# Altium schematic symbol library Opam-Comp...SchLib: 36 symbols
Pins are listed as number, name and electrical type; pins without a type are passive.

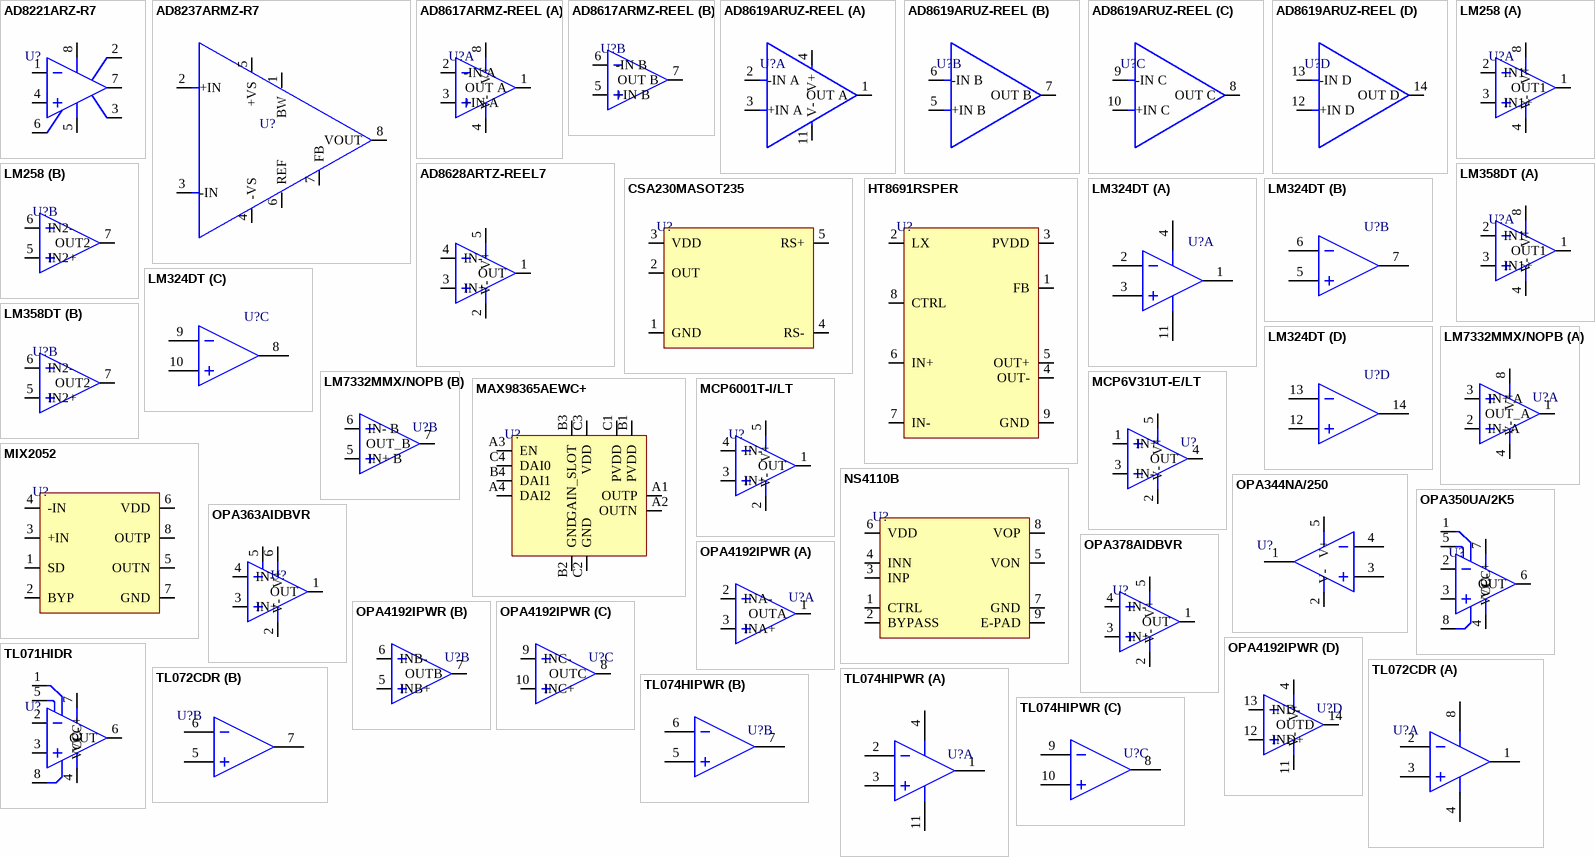
[diagram p0: symbols AD8221ARZ-R7 to TL074HIPWR]

## AD8221ARZ-R7
designator U?
IC OPAMP INSTR 825KHZ 8SOIC; Manufacturer: Analog Devices; Manufacturer Part Number: AD8221ARZ-R7; Number of Channels: 1; Common Mode Rejection Ratio: 80dB; Min Dual Supply Voltage: 2.3V; Max Dual Supply Voltage: 18V; Slew Rate: 2.5V/µs; Nominal Supply Current: 1mA; Max Power Dissipation: 200mW; Bandwidth: 562kHz; Input Bias Current: 1.5nA; Input Offset Voltage (Vos): 60uV; Output Current per Channel: 18mA; Power Supply Rejection Ratio (PSRR): 130dB; Voltage Gain: 60dB; Input Resistance: 100GR; Quiescent Current: 900uA; Operating Supply Voltage: 36V; Supplier 1: Mouser; RoHS: Yes; Category: Amplifiers - Op Amps, Buffer, Instrumentation; Pricing 1: 1=7.37000, 10=6.66000, 25=6.35000, 50=6.35000, 100=5.51000, 250=5.27000, 500=4.80000, 1000=4.37000, 10000=4.37000 (USD); Case/Package: SOIC; Number of Pins: 8; Contact Plating: Tin,Matte; Min Operating Temperature: -40°C; Max Operating Temperature: 85°C; -3db Bandwidth: 825kHz; Package Quantity: 1000; Packaging: Tape and Reel; Number of Circuits: 1; Operating Supply Current: 1mA; Number of Elements: 1; Power Dissipation: 200mW; Series: -; Supply Current: 1mA; Radiation Hardening: No; Lead Free: Contains Lead; RoHS Compliant: Yes; ComponentLink1URL: https://datasheet.ciiva.com/15128/getdatasheetpartid-313520-15128733.pdf?src-supplier=Verical; ComponentLink1Description: https://datasheet.ciiva.com/15128/getdatasheetpartid-313520-15128733.pdf?src-supplier=Verical; ComponentLink2URL: https://datasheet.ciiva.com/2975/ad8221-2975658.pdf?src-supplier=Avnet; ComponentLink2Description: https://datasheet.ciiva.com/2975/ad8221-2975658.pdf?src-supplier=Avnet; ComponentLink3URL: https://datasheet.ciiva.com/2975/ad8221-2975980.pdf?src-supplier=Avnet; ComponentLink3Description: https://datasheet.ciiva.com/2975/ad8221-2975980.pdf?src-supplier=Avnet; ComponentLink4URL: https://datasheet.ciiva.com/6628/ad8221-6628618.pdf?src-supplier=Digi-Key; ComponentLink4Description: https://datasheet.ciiva.com/6628/ad8221-6628618.pdf?src-supplier=Digi-Key; ComponentLink5URL: https://datasheet.ciiva.com/6628/ad8221-6628619.pdf?src-supplier=Digi-Key; ComponentLink5Description: https://datasheet.ciiva.com/6628/ad8221-6628619.pdf?src-supplier=Digi-Key; ComponentLink6URL: https://datasheet.ciiva.com/6628/ad8221-6628617.pdf?src-supplier=Digi-Key; ComponentLink6Description: https://datasheet.ciiva.com/6628/ad8221-6628617.pdf?src-supplier=Digi-Key; ComponentLink7URL: https://datasheet.ciiva.com/48709/001249009-da-01-en-ic-amp-inst-prec-ad8221arz-r7-soic-8-adi-48709526.pdf?src-supplier=Conrad; ComponentLink7Description: https://datasheet.ciiva.com/48709/001249009-da-01-en-ic-amp-inst-prec-ad8221arz-r7-soic-8-adi-48709526.pdf?src-supplier=Conrad; Supplier Part Number 1: 584-AD8221ARZ-R7; LCSC Part Number: C13342; Item Type: IC
footprint SOIC-8
pins: 1 IN-, 2 RG, 3 RG, 4 IN+, 5 V- (power), 6 REF, 7 VOUT, 8 V+ (power)

## AD8237ARMZ-R7
designator U?
IC INST AMP 1 CIRCUIT 8MSOP; Manufacturer: Analog Devices; Manufacturer Part Number: AD8237ARMZ-R7; Supplier: Mouser; LCSC Part Number: C12086; RoHS: Yes; Item Type: IC; Stock: 141226; Pricing: 1=2.88, 10=2.37, 50=2.37, 100=2.13, 1000=1.56, 10000=1.47 (USD); ComponentLink1URL: https://datasheet.ciiva.com/6626/ad8237-6626733.pdf?src-supplier=Digikey; ComponentLink1Description: https://datasheet.ciiva.com/6626/ad8237-6626733.pdf?src-supplier=Digikey; ComponentLink2URL: https://datasheet.ciiva.com/8582/ad8237-8582303.pdf?src-supplier=Avnet; ComponentLink2Description: https://datasheet.ciiva.com/8582/ad8237-8582303.pdf?src-supplier=Avnet
footprint MSOP-8
pins: 1 BW, 2 +IN, 3 -IN, 4 -VS, 5 +VS, 6 REF, 7 FB, 8 VOUT

## AD8617ARMZ-REEL
designator U?
IC CMOS 2 CIRCUIT 8MSOP; Manufacturer: Analog Devices; Manufacturer Part Number: AD8617ARMZ-REEL; Supplier: Mouser; LCSC Part Number: C578787; RoHS: Yes; Item Type: IC; Stock: 4553; Pricing: 1=2.71, 10=2.43, 50=2.43, 100=1.95, 1000=1.33, 10000=1.19 (USD); ComponentLink1URL: https://datasheet.ciiva.com/1793/ad8613-8617-8619-1793776.pdf?src-supplier=Digikey; ComponentLink1Description: https://datasheet.ciiva.com/1793/ad8613-8617-8619-1793776.pdf?src-supplier=Digikey; ComponentLink2URL: https://datasheet.ciiva.com/1793/ad8613-8617-8619-1793777.pdf?src-supplier=Digikey; ComponentLink2Description: https://datasheet.ciiva.com/1793/ad8613-8617-8619-1793777.pdf?src-supplier=Digikey; ComponentLink3URL: https://datasheet.ciiva.com/1793/ad8613-8617-8619-1793778.pdf?src-supplier=Digikey; ComponentLink3Description: https://datasheet.ciiva.com/1793/ad8613-8617-8619-1793778.pdf?src-supplier=Digikey
footprint MSOP-8
part A pins: 1 OUT A, 2 -IN A, 3 +IN A, 4 V- (power), 8 V+ (power)
part B pins: 5 +IN B, 6 -IN B, 7 OUT B

## AD8619ARUZ-REEL
designator U?
IC CMOS 4 CIRCUIT 14TSSOP; Manufacturer: Analog Devices; Manufacturer Part Number: AD8619ARUZ-REEL; Item Type: Opam; Input Capacitance: 2.5pF; Supplier: Mouser; LCSC Part Number: C653014; RoHS: Yes; Stock: 2210; Pricing: 1=3.67, 10=3.12, 50=3.12, 100=2.7, 1000=1.94, 10000=1.84 (USD); Lead Free: 5698LeadFree; ComponentLink1URL: http://components.arrow.com/part/dataview/42367262S9299045N2771?src-supplier=Arrow+Electronics; ComponentLink1Description: http://components.arrow.com/part/dataview/42367262S9299045N2771?src-supplier=Arrow+Electronics; ComponentLink2URL: http://www.mouser.com/ds/2/609/AD8613_8617_8619-877840.pdf?src-supplier=Mouser; ComponentLink2Description: http://www.mouser.com/ds/2/609/AD8613_8617_8619-877840.pdf?src-supplier=Mouser; ComponentLink3URL: https://datasheet.octopart.com/AD8619ARUZ-REEL-Analog-Devices-datasheet-62341446.pdf?src-supplier=Element14; ComponentLink3Description: https://datasheet.octopart.com/AD8619ARUZ-REEL-Analog-Devices-datasheet-62341446.pdf?src-supplier=Element14; ComponentLink4URL: http://www.analog.com/static/imported-files/data_sheets/AD8613_8617_8619.pdf?src-supplier=Avnet; ComponentLink4Description: http://www.analog.com/static/imported-files/data_sheets/AD8613_8617_8619.pdf?src-supplier=Avnet; ComponentLink5URL: http://www.analog.com/media/en/technical-documentation/data-sheets/AD8613_8617_8619.pdf?src-supplier=Digikey; ComponentLink5Description: http://www.analog.com/media/en/technical-documentation/data-sheets/AD8613_8617_8619.pdf?src-supplier=Digikey
footprint TSSOP-14
part A pins: 1 OUT A, 2 -IN A, 3 +IN A, 4 V+, 11 V-
part B pins: 5 +IN B, 6 -IN B, 7 OUT B
part C pins: 8 OUT C, 9 -IN C, 10 +IN C
part D pins: 12 +IN D, 13 -IN D, 14 OUT D

## AD8628ARTZ-REEL7
designator U?
IC OPAMP ZER-DRIFT 1CIRC SOT23-5; -3db Bandwidth: 2.5MHz; Common Mode Rejection Ratio: 140dB; Number of Channels: 1; Max Supply Voltage: 5V; Min Supply Voltage: 2.7V; Operating Supply Voltage: 3V; Min Dual Supply Voltage: 1.35V; Max Dual Supply Voltage: 2.5V; Slew Rate: 1V/µs; Input Bias Current: 30pA; Input Offset Voltage (Vos): 5uV; Operating Supply Current: 1.1mA; Output Current per Channel: 30mA; Power Supply Rejection Ratio (PSRR): 130dB; Voltage Gain: 145dB; Input Capacitance: 10pF; LCSC Part Number: C29309; Item Type: IC; ComponentLink1Description: LCSC; Supplier: Mouser; Supplier Part Number: 584-AD8628ARTZ-R7; RoHS: Yes; Category: Amplifiers - Op Amps, Buffer, Instrumentation; Stock: 158154; Pricing: 1=3.02, 10=2.6, 50=2.6, 100=2.31, 1000=1.63, 10000=1.58 (USD); Case/Package: SOT-23-5; Pins: 5; Min Operating Temperature: -40°C; Max Operating Temperature: 125°C; Package Quantity: 1; Packaging: Tape and Reel; Unity Gain Bandwidth Product: 2.5MHz; Bandwidth: 2.5MHz; Number of Circuits: 1; Gain Bandwidth Product: 2.5MHz; Number of Elements: 1; Number of Amplifiers: 1; Quiescent Current: 1.1mA; Series: -; Radiation Hardening: No; Reach SVHC Compliant: No; Lead Free: Contains Lead; RoHS Compliant: Yes; ComponentLink2URL: https://datasheet.ciiva.com/1135/ad8628-8629-8630-1135896.pdf?src-supplier=Element14; ComponentLink2Description: https://datasheet.ciiva.com/1135/ad8628-8629-8630-1135896.pdf?src-supplier=Element14; ComponentLink3URL: https://datasheet.ciiva.com/46387/1852416-46387199.pdf?src-supplier=Element14; ComponentLink3Description: https://datasheet.ciiva.com/46387/1852416-46387199.pdf?src-supplier=Element14; ComponentLink4URL: https://datasheet.ciiva.com/15374/ad8628-8629-8630-249176-15374303.pdf?src-supplier=Mouser; ComponentLink4Description: https://datasheet.ciiva.com/15374/ad8628-8629-8630-249176-15374303.pdf?src-supplier=Mouser; ComponentLink5URL: https://datasheet.ciiva.com/2976/ad8628-8629-8630-2976036.pdf?src-supplier=Avnet; ComponentLink5Description: https://datasheet.ciiva.com/2976/ad8628-8629-8630-2976036.pdf?src-supplier=Avnet
footprint SOT-23-5
pins: 1 OUT, 2 V- (power), 3 IN+, 4 IN-, 5 V+ (power)

## CSA230MASOT235
designator U?
0V~76V Single SOT23-5 Current Sense Amplifiers ROHS; Manufacturer: analogysemi; Manufacturer Part Number: CSA230MASOT235; Item Type: IC; Package: SOT23-5; LCSC Part Number: C5359404; ComponentLink1Description: LCSC; ComponentLink1URL: https://www.lcsc.com/product-detail/Current-Sense-Amplifiers_analogysemi-CSA230MASOT235_C5359404.html
footprint SOT-23-5
pins: 1 GND, 2 OUT, 3 VDD, 4 RS-, 5 RS+

## HT8691RSPER
designator U?
SOP8L-PP Audio Power OpAmps ROHS; Manufacturer: Jiaxing Heroic Elec Tech; Manufacturer Part Number: HT8691RSPER; Item Type: IC; Package: SOP8L-PP; LCSC Part Number: C6705234; ComponentLink1Description: LCSC; ComponentLink1URL: https://www.lcsc.com/product-detail/Audio-Power-OpAmps_Jiaxing-Heroic-Elec-Tech-HT8691RSPER_C6705234.html
footprint 8-SO-EP_
pins: 1 FB, 2 LX, 3 PVDD, 4 OUT-, 5 OUT+, 6 IN+, 7 IN-, 8 CTRL, 9 GND

## LM258
designator U?
Dual 250nA 5mV SOP-8 Operational Amplifier ROHS; Manufacturer: HXY MOSFET; Manufacturer Part Number: LM258; Item Type: Opam; Package: SOP-8; LCSC Part Number: C6851436; ComponentLink1Description: LCSC; ComponentLink1URL: https://www.lcsc.com/product-detail/Operational-Amplifier_HXY-MOSFET-LM258_C6851436.html
footprint SOP-8
part A pins: 1 OUT1, 2 IN1-, 3 IN1+, 4 V- (power), 8 V+ (power)
part B pins: 5 IN2+, 6 IN2-, 7 OUT2

## LM324DT
designator U?
IC OPAMP GP 1.3MHZ 14SO; Manufacturer: STMicroelectronics; Manufacturer Part Number: LM324DT; Max Supply Voltage: 30V; Min Supply Voltage: 3V; Min Dual Supply Voltage: 1.5V; Max Dual Supply Voltage: 15V; Voltage Gain: 100dB; Slew Rate: 0.4V/µs; Common Mode Rejection Ratio: 70dB; Nominal Supply Current: 1.2mA; Input Offset Voltage (Vos): 7mV; Input Bias Current: 150nA; Number of Circuits: 4; Output Current per Channel: 40mA; Dual Supply Voltage: 12V; Supply Type: Single,Dual; Input Voltage Noise Density: 40nV/sqrt Hz; Max Power Dissipation: 400mW; Supplier 1: Arrow Electronics; RoHS: Yes; LCSC Part Number: C71035; Stock 1: 287500; Pricing 1: 2500=0.18900 (USD); Mount: Surface Mount; Case/Package: SO; Number of Pins: 14; Contact Plating: Tin,Matte; Weight: 0.009143oz; Min Operating Temperature: 0°C; Max Operating Temperature: 70°C; Gain Bandwidth Product: 1.3MHz; Packaging: Cut Tape; Package Quantity: 2500; Operating Supply Current: 1.2mA; Operating Supply Voltage: 15V; Number of Channels: 4; Output Current: 40mA; Number of Elements: 4; Series: LM324; Technology: BIPOLAR; Bandwidth: 1.3MHz; Number of Amplifiers: 4; Unity Gain Bandwidth Product: 1.3MHz; Item Type: IC; Width: 4mm; Height: 1.65mm; Radiation Hardening: No; RoHS Compliant: Yes; Lead Free: Lead Free; REACH SVHC: No SVHC; ComponentLink1URL: https://datasheet.ciiva.com/4758/cd00000457-103203-4758032.pdf?src-supplier=Mouser; ComponentLink1Description: https://datasheet.ciiva.com/4758/cd00000457-103203-4758032.pdf?src-supplier=Mouser; ComponentLink2URL: https://datasheet.ciiva.com/8008/1834360-8008827.pdf?src-supplier=Element14; ComponentLink2Description: https://datasheet.ciiva.com/8008/1834360-8008827.pdf?src-supplier=Element14; ComponentLink3URL: https://datasheet.ciiva.com/8008/1834360-8008490.pdf?src-supplier=Element14; ComponentLink3Description: https://datasheet.ciiva.com/8008/1834360-8008490.pdf?src-supplier=Element14; ComponentLink4URL: https://datasheet.ciiva.com/28630/1834360-28630538.pdf?src-supplier=Element14; ComponentLink4Description: https://datasheet.ciiva.com/28630/1834360-28630538.pdf?src-supplier=Element14; ComponentLink5URL: https://datasheet.ciiva.com/1795/cd00000457-1795560.pdf?src-supplier=Digi-Key; ComponentLink5Description: https://datasheet.ciiva.com/1795/cd00000457-1795560.pdf?src-supplier=Digi-Key; ComponentLink6URL: https://datasheet.ciiva.com/1795/cd00000457-1795559.pdf?src-supplier=Digi-Key; ComponentLink6Description: https://datasheet.ciiva.com/1795/cd00000457-1795559.pdf?src-supplier=Digi-Key; ComponentLink7URL: https://datasheet.ciiva.com/1795/cd00000457-1795561.pdf?src-supplier=Digi-Key; ComponentLink7Description: https://datasheet.ciiva.com/1795/cd00000457-1795561.pdf?src-supplier=Digi-Key; ComponentLink8URL: https://datasheet.ciiva.com/16375/cd00000457-16375528.pdf?src-supplier=Future+Electronics; ComponentLink8Description: https://datasheet.ciiva.com/16375/cd00000457-16375528.pdf?src-supplier=Future+Electronics; Supplier Part Number 1: LM324DT
footprint 14-SO
part A pins: 1 1OUT, 2 IN-, 3 IN+, 4 VCC+ (power), 11 VCC- (power)
part B pins: 5 2IN+, 6 2IN-, 7 2OUT
part C pins: 8 3OUT, 9 3IN-, 10 3IN+
part D pins: 12 4IN+, 13 4IN-, 14 4OUT

## LM358DT
designator U?
IC OPAMP GP 2 CIRCUIT 8SOIC; Manufacturer: STMicroelectronics; Manufacturer Part Number: LM358DT; Item Type: Opam; Supplier: Mouser; Supplier Part Number: 511-LM358DT; RoHS: Yes; Stock: 69809; Pricing: 1=0.39, 10=0.266, 50=0.266, 100=0.155, 1000=0.097, 10000=0.074 (USD); ComponentLink1URL: https://datasheet.ciiva.com/15129/getdatasheetpartid-39583-15129679.pdf?src-supplier=Verical; ComponentLink1Description: https://datasheet.ciiva.com/15129/getdatasheetpartid-39583-15129679.pdf?src-supplier=Verical; ComponentLink2URL: https://datasheet.ciiva.com/29306/155599-da-01-en-op-verst-lm358dt-stm-29306826.pdf?src-supplier=Conrad; ComponentLink2Description: https://datasheet.ciiva.com/29306/155599-da-01-en-op-verst-lm358dt-stm-29306826.pdf?src-supplier=Conrad; ComponentLink3URL: https://datasheet.ciiva.com/14544/70013561-14544747.pdf?src-supplier=Allied+Electronics; ComponentLink3Description: https://datasheet.ciiva.com/14544/70013561-14544747.pdf?src-supplier=Allied+Electronics; ComponentLink4URL: https://datasheet.ciiva.com/16371/cd00000464-16371207.pdf?src-supplier=Future+Electronics; ComponentLink4Description: https://datasheet.ciiva.com/16371/cd00000464-16371207.pdf?src-supplier=Future+Electronics; ComponentLink5URL: https://datasheet.ciiva.com/1795/cd00000464-1795490.pdf?src-supplier=Digikey; ComponentLink5Description: https://datasheet.ciiva.com/1795/cd00000464-1795490.pdf?src-supplier=Digikey; ComponentLink6URL: https://datasheet.ciiva.com/1795/cd00000464-1795491.pdf?src-supplier=Digikey; ComponentLink6Description: https://datasheet.ciiva.com/1795/cd00000464-1795491.pdf?src-supplier=Digikey; ComponentLink7URL: https://datasheet.ciiva.com/1795/cd00000464-1795492.pdf?src-supplier=Digikey; ComponentLink7Description: https://datasheet.ciiva.com/1795/cd00000464-1795492.pdf?src-supplier=Digikey
footprint SOP-8
part A pins: 1 OUT1, 2 IN1-, 3 IN1+, 4 V- (power), 8 V+ (power)
part B pins: 5 IN2+, 6 IN2-, 7 OUT2

## LM7332MMX/NOPB
designator U?
IC OPAMP GP 2 CIRCUIT 8VSSOP; Manufacturer: TI National Semiconductor; Manufacturer Part Number: LM7332MMX/NOPB; Supplier: Mouser; LCSC Part Number: C1848183; RoHS: No; Item Type: IC; Stock: 5379; Pricing: 1=3.1, 10=2.13, 50=2.13, 100=1.92, 1000=1.7, 10000=1.67 (USD); ComponentLink1URL: https://datasheet.ciiva.com/14463/lm7332-14463062.pdf?src-supplier=Avnet; ComponentLink1Description: https://datasheet.ciiva.com/14463/lm7332-14463062.pdf?src-supplier=Avnet; ComponentLink2URL: https://datasheet.ciiva.com/6628/lm7332-6628237.pdf?src-supplier=Digikey; ComponentLink2Description: https://datasheet.ciiva.com/6628/lm7332-6628237.pdf?src-supplier=Digikey
footprint VSSOP-8
part A pins: 1 OUT_A, 2 IN- A, 3 IN+ A, 4 V- (power), 8 V+ (power)
part B pins: 5 IN+ B, 6 IN- B, 7 OUT_B

## MAX98365AEWC+
designator U?
Amplifier IC 1-Channel (Mono) Class D 12-WLP (1.21x1.78); Manufacturer: Analog Devices Inc./Maxim Integrated; Manufacturer Part Number: MAX98365AEWC+; Package: WLP-12(1.2x1.8); LCSC Part Number: C4991260; Item Type: Amplifier
footprint WLP-12 (1.2x1.8)
pins: A1 OUTP, A2 OUTN, A3 EN, A4 DAI2, B1 PVDD, B2 GND, B3 GAIN_SLOT, B4 DAI1, C1 PVDD, C2 GND, C3 VDD, C4 DAI0

## MCP6V31UT-E/LT
designator U?
IC OPAMP ZERO-DRIFT 1CIRC SC70-5; Manufacturer: Microchip; Manufacturer Part Number: MCP6V31UT-E/LT; Supplier: Arrow Electronics; LCSC Part Number: C623527; RoHS: Yes; Item Type: IC; Stock: 2169; Pricing: 1=1.399, 10=1.377, 25=1.356, 100=1.334, 250=1.313, 500=1.291, 1000=1.27 (USD); ComponentLink1URL: https://datasheet.ciiva.com/8079/1599560-8079067.pdf?src-supplier=Element14; ComponentLink1Description: https://datasheet.ciiva.com/8079/1599560-8079067.pdf?src-supplier=Element14; ComponentLink2URL: https://datasheet.ciiva.com/6627/25127a-6627383.pdf?src-supplier=Digikey; ComponentLink2Description: https://datasheet.ciiva.com/6627/25127a-6627383.pdf?src-supplier=Digikey; ComponentLink3URL: https://datasheet.ciiva.com/6627/25127a-6627384.pdf?src-supplier=Digikey; ComponentLink3Description: https://datasheet.ciiva.com/6627/25127a-6627384.pdf?src-supplier=Digikey; ComponentLink4URL: https://datasheet.ciiva.com/6627/25127a-6627385.pdf?src-supplier=Digikey; ComponentLink4Description: https://datasheet.ciiva.com/6627/25127a-6627385.pdf?src-supplier=Digikey; ComponentLink5URL: https://datasheet.ciiva.com/2966/25127a-2966474.pdf?src-supplier=Avnet; ComponentLink5Description: https://datasheet.ciiva.com/2966/25127a-2966474.pdf?src-supplier=Avnet; ComponentLink6URL: https://datasheet.ciiva.com/26922/getdatasheetpartid-556897-26922826.pdf?src-supplier=Verical; ComponentLink6Description: https://datasheet.ciiva.com/26922/getdatasheetpartid-556897-26922826.pdf?src-supplier=Verical; ComponentLink7URL: https://datasheet.ciiva.com/16338/filehandler-aspxddocname-en557758-16338408.pdf?src-supplier=Future+Electronics; ComponentLink7Description: https://datasheet.ciiva.com/16338/filehandler-aspxddocname-en557758-16338408.pdf?src-supplier=Future+Electronics
footprint SC-70-5
pins: 1 IN+, 2 V- (power), 3 IN-, 4 OUT, 5 V+ (power)

## MCP6001T-I/LT
designator U?
IC OPAMP GP 1 CIRCUIT SC70-5; Manufacturer: Microchip; Manufacturer Part Number: MCP6001T-I/LT; Item Type: Opam; Slew Rate: 0.6V/µs; Number of Circuits: 1; Input Offset Voltage (Vos): 4.5mV; Input Bias Current: 1pA; Gain Bandwidth Product: 1MHz; Amplifier Type: GENERAL PURPOSE; Output Current per Channel: 23mA; Common Mode Rejection Ratio: 60dB; Max Supply Voltage: 6V; Min Supply Voltage: 1.8V; Voltage Gain: 112dB; Power Supply Rejection Ratio (PSRR): 86dB; Clock Frequency: 1kHz; Supply Current: 100uA; Supplier: Arrow Electronics; LCSC Part Number: C47040; RoHS: Yes; Stock: 15000; Pricing: 3000=0.2694 (USD); Mounting Technology: Surface Mount; Case/Package: SC; Pins: 5; Min Operating Temperature: -40°C; Max Operating Temperature: 85°C; Packaging: Tape and Reel; Series: -; Package Quantity: 3000; Unity Gain Bandwidth Product: 1MHz; Bandwidth: 1MHz; Number of Channels: 1; Output Current: 23mA; Number of Amplifiers: 1; Number of Elements: 1; Technology: CMOS; Slew Rate-Nom: 0.6V/µs; Input Offset Voltage-Max: 4.5mV; Length: 0.088inch; Width: 0.053inch; Height: 0.039inch; Radiation Hardening: No; Reach SVHC Compliant: No; RoHS Compliant: Yes; Lead Free: Lead Free; ComponentLink1URL: https://datasheet.ciiva.com/14151/mcp6001-2-4-eng-tds-14151484.pdf?src-supplier=Distrelec; ComponentLink1Description: https://datasheet.ciiva.com/14151/mcp6001-2-4-eng-tds-14151484.pdf?src-supplier=Distrelec; ComponentLink2URL: https://datasheet.ciiva.com/28630/10391-28630549.pdf?src-supplier=Element14; ComponentLink2Description: https://datasheet.ciiva.com/28630/10391-28630549.pdf?src-supplier=Element14; ComponentLink3URL: https://datasheet.ciiva.com/13042/21733e-41017-13042649.pdf?src-supplier=Mouser; ComponentLink3Description: https://datasheet.ciiva.com/13042/21733e-41017-13042649.pdf?src-supplier=Mouser; ComponentLink4URL: https://datasheet.ciiva.com/22711/524878-22711930.pdf?src-supplier=Element14; ComponentLink4Description: https://datasheet.ciiva.com/22711/524878-22711930.pdf?src-supplier=Element14; ComponentLink5URL: https://datasheet.ciiva.com/16200/filehandler-aspxddocname-en011705-16200343.pdf?src-supplier=Future+Electronics; ComponentLink5Description: https://datasheet.ciiva.com/16200/filehandler-aspxddocname-en011705-16200343.pdf?src-supplier=Future+Electronics; ComponentLink6URL: https://datasheet.ciiva.com/1793/21733j-1793065.pdf?src-supplier=Digikey; ComponentLink6Description: https://datasheet.ciiva.com/1793/21733j-1793065.pdf?src-supplier=Digikey; ComponentLink7URL: https://datasheet.ciiva.com/1793/21733j-1793064.pdf?src-supplier=Digikey; ComponentLink7Description: https://datasheet.ciiva.com/1793/21733j-1793064.pdf?src-supplier=Digikey; ComponentLink8URL: https://datasheet.ciiva.com/1793/21733j-1793066.pdf?src-supplier=Digikey; ComponentLink8Description: https://datasheet.ciiva.com/1793/21733j-1793066.pdf?src-supplier=Digikey; ComponentLink9URL: https://datasheet.ciiva.com/41459/001084849-da-01-en-ic-opamp-1-8v-mcp6001t-i-lt-sc-70-5-mcp-41459063.pdf?src-supplier=Conrad; ComponentLink9Description: https://datasheet.ciiva.com/41459/001084849-da-01-en-ic-opamp-1-8v-mcp6001t-i-lt-sc-70-5-mcp-41459063.pdf?src-supplier=Conrad
footprint SC-70-5
pins: 1 OUT, 2 V- (power), 3 IN+, 4 IN-, 5 V+ (power)

## MIX2052
designator U?
SOP-8 Audio Power OpAmps ROHS; Manufacturer: MIXINNO; Manufacturer Part Number: MIX2052; Item Type: IC; Package: SOP-8; LCSC Part Number: C427090; ComponentLink1Description: LCSC; ComponentLink1URL: https://www.lcsc.com/product-detail/Audio-Power-OpAmps_MIXINNO-MIX2052_C427090.html
footprint SOP-8
pins: 1 SD, 2 BYP, 3 +IN, 4 -IN , 5 OUTN, 6 VDD, 7 GND, 8 OUTP

## NS4110B
designator U?
SOP-8-EP Audio Power OpAmps ROHS; Manufacturer: Shenzhen Nsiway Tech; Manufacturer Part Number: NS4110B; Item Type: IC; Package: SOP-8-EP; LCSC Part Number: C5334145; ComponentLink1Description: LCSC; ComponentLink1URL: https://www.lcsc.com/product-detail/Audio-Power-OpAmps_Shenzhen-Nsiway-Tech-NS4110B_C5334145.html
footprint 8-SOIC-EP
pins: 1 CTRL, 2 BYPASS, 3 INP, 4 INN, 5 VON, 6 VDD, 7 GND, 8 VOP, 9 E-PAD

## OPA344NA/250
designator U?
IC OPAMP GP 1 CIRCUIT SOT23-5; Manufacturer: Texas Instruments; Manufacturer Part Number: OPA344NA/250; Nominal Supply Current: 250uA; Bandwidth: 1MHz; Min Supply Voltage: 2.7V; Max Supply Voltage: 5.5V; Voltage Gain: 122dB; Common Mode Rejection Ratio: 76dB; Number of Channels: 1; Slew Rate: 0.8V/µs; Max I/O Voltage: 1mV; Input Bias Current: 10pA; Power Supply Rejection Ratio (PSRR): 90.46dB; Output Current per Channel: 15mA; Quiescent Current: 250mA; Supplier 1: Digi-Key; Stock 1: 6132; Pricing 1: 1=1.59, 10=1.43, 25=1.3492, 100=1.0794 (USD); Case/Package: SOT-23; Number of Pins: 5; Min Operating Temperature: -40°C; Max Operating Temperature: 85°C; Packaging: Tape and Reel; Package Quantity: 250; Unity Gain Bandwidth Product: 1MHz; Input Offset Voltage (Vos): 1mV; Gain Bandwidth Product: 1MHz; Number of Circuits: 1; Number of Amplifiers: 1; Number of Elements: 1; Length: 2.9mm; Height: 1.15mm; Width: 1.6mm; Radiation Hardening: No; REACH SVHC: No SVHC; Lead Free: Lead Free; ComponentLink1URL: http://www.ti.com/general/docs/lit/getliterature.tsp?genericPartNumber=OPA344&fileType=pdf&src-supplier=Newark; ComponentLink1Description: http://www.ti.com/general/docs/lit/getliterature.tsp?genericPartNumber=OPA344&fileType=pdf&src-supplier=Newark; ComponentLink2URL: http://www.farnell.com/datasheets/1882856.pdf?src-supplier=Element14; ComponentLink2Description: http://www.farnell.com/datasheets/1882856.pdf?src-supplier=Element14; ComponentLink3URL: http://www.ti.com/lit/ds/symlink/opa344.pdf?src-supplier=Digi-Key; ComponentLink3Description: http://www.ti.com/lit/ds/symlink/opa344.pdf?src-supplier=Digi-Key; ComponentLink4URL: http://focus.ti.com/lit/ds/symlink/opa344.pdf?src-supplier=Avnet+Europe; ComponentLink4Description: http://focus.ti.com/lit/ds/symlink/opa344.pdf?src-supplier=Avnet+Europe; ComponentLink5URL: http://www.ti.com/general/docs/lit/getliterature.tsp?genericPartNumber=OPA4345&&fileType=pdf&src-supplier=Avnet; ComponentLink5Description: http://www.ti.com/general/docs/lit/getliterature.tsp?genericPartNumber=OPA4345&&fileType=pdf&src-supplier=Avnet; Supplier Part Number 1: OPA344NACT-ND; LCSC Part Number: C131974; Item Type: IC
footprint SOT-23-5
pins: 1 OUT, 2 V- (power), 3 IN+, 4 IN-, 5 V+ (power)

## OPA350UA/2K5
designator U?
IC OPAMP GP 1 CIRCUIT 8SOIC; Manufacturer: Texas Instruments; Manufacturer Part Number: OPA350UA/2K5; Max Supply Voltage: 5.5V; Min Supply Voltage: 2.7V; Voltage Gain: 122dB; Common Mode Rejection Ratio: 66dB; Number of Channels: 1; Slew Rate: 22V/µs; Max I/O Voltage: 1mV; Gain Bandwidth Product: 38MHz; Input Bias Current: 10pA; Input Offset Voltage (Vos): 500uV; Operating Supply Current: 5.2mA; Output Current per Channel: 40mA; Power Supply Rejection Ratio (PSRR): 87.96dB; Amplifier Type: GENERAL PURPOSE; Supply Current: 7.5mA; Supplier: Digikey; Supplier Part Number: 296-41366-1-ND; RoHS: Yes; Category: Amplifiers - Op Amps, Buffer, Instrumentation; Stock: 2896; Pricing: 1=2.98, 10=2.675, 25=2.5292, 100=2.1921, 250=2.07964, 500=1.86606, 1000=1.57378 (USD); Case/Package: D; Pins: 8; Weight: 0.002677oz; Min Operating Temperature: -40°C; Max Operating Temperature: 85°C; Packaging: Tape and Reel; Package Quantity: 2500; Number of Circuits: 1; Bandwidth: 38MHz; Series: MicroAmplifier™; Unity Gain Bandwidth Product: 38MHz; Number of Elements: 1; Technology: CMOS; Radiation Hardening: No; Lead Free: Lead Free; RoHS Compliant: Yes; ComponentLink1URL: https://datasheet.ciiva.com/1814/opa350-1814331.pdf?src-supplier=Digikey; ComponentLink1Description: https://datasheet.ciiva.com/1814/opa350-1814331.pdf?src-supplier=Digikey; ComponentLink2URL: https://datasheet.ciiva.com/14347/sbos099c-14347229.pdf?src-supplier=Avnet; ComponentLink2Description: https://datasheet.ciiva.com/14347/sbos099c-14347229.pdf?src-supplier=Avnet; LCSC Part Number: C13388; Item Type: IC
footprint SOIC-8(0.154", 3.90mm Width)
pins: 1 NC (power), 2 IN-, 3 IN+, 4 VCC- (power), 5 NC (power), 6 OUT, 7 VCC+ (power), 8 NC (power)

## OPA363AIDBVR
designator U?
IC OPAMP GP 1 CIRCUIT SOT23-6; Manufacturer: Texas Instruments; Manufacturer Part Number: OPA363AIDBVR; Supplier 1: Digikey; RoHS: Yes; Item Type: IC; Stock 1: 2246; Pricing 1: 1=1.86, 10=1.67, 25=1.5756, 100=1.3424, 250=1.26048, 500=1.10292, 1000=0.91385 (USD); ComponentLink1URL: https://datasheet.ciiva.com/1813/opa2364-1813015.pdf?src-supplier=Digikey; ComponentLink1Description: https://datasheet.ciiva.com/1813/opa2364-1813015.pdf?src-supplier=Digikey; Supplier Part Number 1: 296-48631-1-ND; LCSC Part Number: C2058417
footprint SOT-23-6
pins: 1 OUT, 2 V- (power), 3 IN+, 4 IN-, 5 EN (power), 6 V+ (power)

## OPA378AIDBVR
designator U?
IC OPAMP ZER-DRIFT 1CIRC SOT23-5; Manufacturer: Texas Instruments; Manufacturer Part Number: OPA378AIDBVR; Supplier: Mouser; RoHS: Yes; Item Type: IC; Stock: 1753; Pricing: 1=1.96, 10=1.35, 50=1.35, 100=1.18, 1000=0.992, 10000=0.911 (USD); ComponentLink1URL: https://datasheet.ciiva.com/14463/sbos417d-14463248.pdf?src-supplier=Avnet; ComponentLink1Description: https://datasheet.ciiva.com/14463/sbos417d-14463248.pdf?src-supplier=Avnet; ComponentLink2URL: https://datasheet.ciiva.com/1813/opa2378-1813508.pdf?src-supplier=Digikey; ComponentLink2Description: https://datasheet.ciiva.com/1813/opa2378-1813508.pdf?src-supplier=Digikey
footprint SOT-23-5
pins: 1 OUT, 2 V- (power), 3 IN+, 4 IN-, 5 V+ (power)

## OPA4192IPWR
designator U?
IC OPAMP GP 4 CIRCUIT 14TSSOP; Manufacturer: Texas Instruments; Manufacturer Part Number: OPA4192IPWR; Supplier: Mouser; LCSC Part Number: C2057935; RoHS: Yes; Item Type: IC; Stock: 4607; Pricing: 1=6.33, 10=4.87, 50=4.5, 100=4.1, 1000=3.67, 10000=3.59 (USD); ComponentLink1URL: http://www.ti.com/general/docs/suppproductinfo.tsp?distId=10&amp;gotoUrl=http%3A%2F%2Fwww.ti.com%2Flit%2Fgpn%2Fopa4192&src-supplier=Digikey; ComponentLink1Description: http://www.ti.com/general/docs/suppproductinfo.tsp?distId=10&amp;gotoUrl=http%3A%2F%2Fwww.ti.com%2Flit%2Fgpn%2Fopa4192&src-supplier=Digikey; ComponentLink2URL: http://www.ti.com/lit/gpn/opa4192?src-supplier=Mouser; ComponentLink2Description: http://www.ti.com/lit/gpn/opa4192?src-supplier=Mouser
footprint 14-TSSOP
part A pins: 1 OUTA, 2 INA-, 3 INA+
part B pins: 5 INB+, 6 INB-, 7 OUTB
part C pins: 8 OUTC, 9 INC-, 10 INC+
part D pins: 4 V+ (power), 11 V- (power), 12 IND+, 13 IND-, 14 OUTD

## TL071HIDR
designator U?
IC OPAMP JFET 1 CIRCUIT 8SOIC; Manufacturer: Texas Instruments; Manufacturer Part Number: TL071HIDR; Supplier: Mouser; Supplier Part Number: 595-TL071HIDR; RoHS: No; Category: Amplifiers - Op Amps, Buffer, Instrumentation; Stock: 8676; Pricing: 1=0.41, 10=0.286, 50=0.286, 100=0.167, 1000=0.099, 10000=0.076 (USD); LCSC Part Number: C5214234; Item Type: IC
footprint SOIC-8
pins: 1 NC (power), 2 IN-, 3 IN+, 4 VCC- (power), 5 NC (power), 6 OUT, 7 VCC+ (power), 8 NC (power)

## TL072CDR
designator U?
J-FET Amplifier 2 Circuit  8-SOIC; Manufacturer: Texas Instruments; Manufacturer Part Number: TL072CDR; Operating Supply Voltage: 18V; Voltage Gain: 106.02dB; Unity Gain Bandwidth Product: 3MHz; Min Dual Supply Voltage: 3.5V; Nominal Supply Current: 5mA; Common Mode Rejection Ratio: 70dB; Number of Channels: 2; Slew Rate: 13V/µs; Max I/O Voltage: 10mV; Input Bias Current: 200pA; Operating Supply Current: 1.4mA; Dual Supply Voltage: 9V; Item Type: IC; Supplier 1: Arrow Electronics; RoHS: Yes; Category: Amplifiers - Op Amps, Buffer, Instrumentation; Stock 1: 1137; Pricing 1: 1=0.69620, 10=0.69390, 25=0.69170, 100=0.68940, 250=0.68720, 500=0.68490, 1000=0.68260 (USD); Case/Package: D; Number of Pins: 8; Contact Plating: Gold; Min Operating Temperature: -40°C; Max Operating Temperature: 85°C; Package Quantity: 2500; Packaging: Tape and Reel; Max Dual Supply Voltage: 18V; Bandwidth: 3MHz; Nominal Gain Bandwidth Product: 3MHz; Number of Circuits: 2; Gain Bandwidth Product: 3MHz; Input Offset Voltage (Vos): 10mV; Number of Elements: 2; Supply Current: 5mA; Technology: BIFET; Max Supply Voltage: 18V; Series: -; Number of Amplifiers: 2; Length: 4.9mm; Width: 3.91mm; Height: 1.58mm; Radiation Hardening: No; RoHS Compliant: Yes; Lead Free: Lead Free; Reach SVHC Compliant: Yes; ComponentLink1URL: https://datasheet.ciiva.com/1795/tl071a-1795600.pdf?src-supplier=Digi-Key; ComponentLink1Description: https://datasheet.ciiva.com/1795/tl071a-1795600.pdf?src-supplier=Digi-Key; ComponentLink2URL: https://datasheet.ciiva.com/46392/1882732-46392284.pdf?src-supplier=Element14; ComponentLink2Description: https://datasheet.ciiva.com/46392/1882732-46392284.pdf?src-supplier=Element14; ComponentLink3URL: https://datasheet.ciiva.com/1795/tl071a-1795599.pdf?src-supplier=Digi-Key; ComponentLink3Description: https://datasheet.ciiva.com/1795/tl071a-1795599.pdf?src-supplier=Digi-Key; ComponentLink4URL: https://datasheet.ciiva.com/1795/tl071a-1795598.pdf?src-supplier=Digi-Key; ComponentLink4Description: https://datasheet.ciiva.com/1795/tl071a-1795598.pdf?src-supplier=Digi-Key; ComponentLink5URL: https://datasheet.ciiva.com/7709/1862384-7709919.pdf?src-supplier=Element14; ComponentLink5Description: https://datasheet.ciiva.com/7709/1862384-7709919.pdf?src-supplier=Element14; ComponentLink6URL: https://datasheet.ciiva.com/2974/tl074-2974203.pdf?src-supplier=Avnet; ComponentLink6Description: https://datasheet.ciiva.com/2974/tl074-2974203.pdf?src-supplier=Avnet; Supplier Part Number 1: TL072CDR; LCSC Part Number: C67473
footprint SOIC-8
part A pins: 1 1OUT, 2 1IN-, 3 1IN+, 4 VCC- (power), 8 VCC+ (power)
part B pins: 5 2IN+, 6 2IN-, 7 2OUT

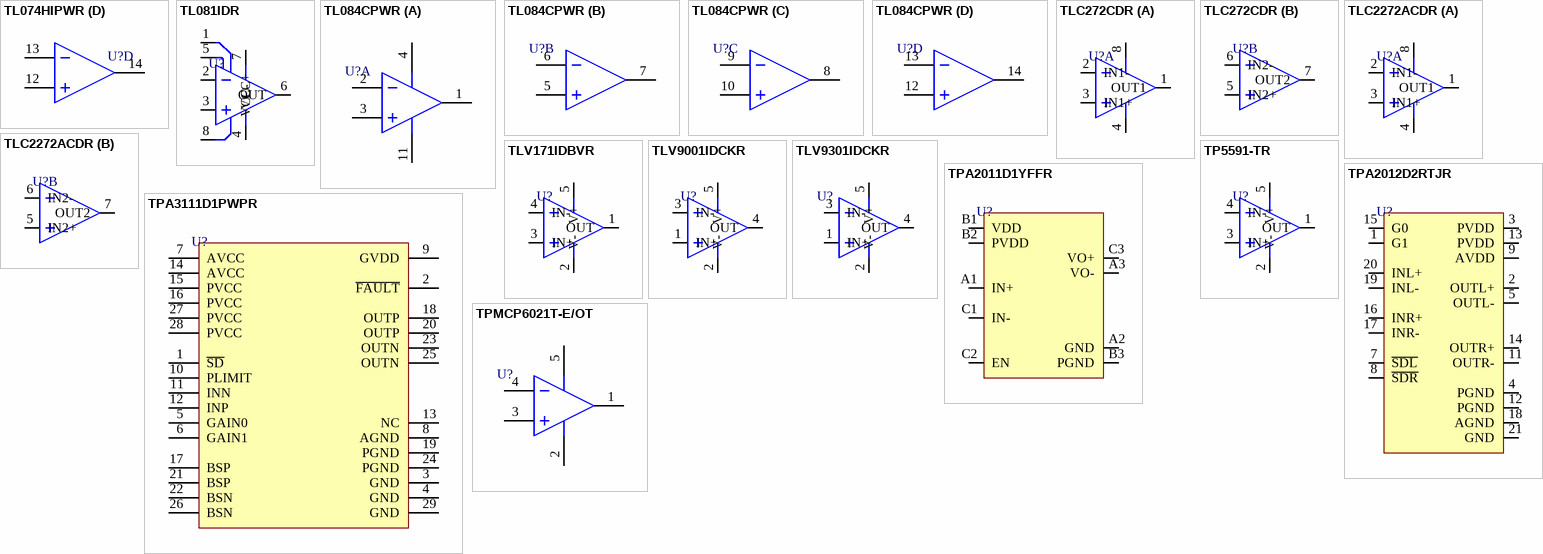
[diagram p1: symbols TL074HIPWR to TPMCP6021T-E/OT]

## TL074HIPWR
designator U?
IC OPAMP JFET 4 CIRCUIT 14TSSOP; Manufacturer: Texas Instruments; Manufacturer Part Number: TL074HIPWR; Supplier: Mouser; LCSC Part Number: C4370424; RoHS: No; Item Type: IC; Stock: 67959; Pricing: 1=0.26, 10=0.156, 50=0.156, 100=0.117, 1000=0.112, 10000=0.101 (USD); Case/Package: 71Case; Pins: 14NUMBER; Length: 5mm; Width: 4.4mm; Height: 1.2mm; Thickness: 1mm
footprint TSSOP-14
part A pins: 1 1OUT, 2 1IN-, 3 1IN+, 4 VCC+ (power), 11 VCC- (power)
part B pins: 5 2IN+, 6 2IN-, 7 2OUT
part C pins: 8 3OUT, 9 3IN-, 10 3IN+
part D pins: 12 4IN+, 13 4IN-, 14 4OUT

## TL081IDR
designator U?
IC OPAMP JFET 1 CIRCUIT 8SOIC; Manufacturer: Texas Instruments; Manufacturer Part Number: TL081IDR; Item Type: Opam; Supplier: Mouser; Supplier Part Number: 595-TL081IDR; RoHS: Yes; Stock: 6587; Pricing: 1=0.42, 10=0.313, 50=0.313, 100=0.175, 1000=0.127, 10000=0.105 (USD); ComponentLink1URL: https://datasheet.ciiva.com/1796/tl081a-1796742.pdf?src-supplier=Digikey; ComponentLink1Description: https://datasheet.ciiva.com/1796/tl081a-1796742.pdf?src-supplier=Digikey; ComponentLink2URL: https://datasheet.ciiva.com/1796/tl081a-1796743.pdf?src-supplier=Digikey; ComponentLink2Description: https://datasheet.ciiva.com/1796/tl081a-1796743.pdf?src-supplier=Digikey; ComponentLink3URL: https://datasheet.ciiva.com/1796/tl081a-1796744.pdf?src-supplier=Digikey; ComponentLink3Description: https://datasheet.ciiva.com/1796/tl081a-1796744.pdf?src-supplier=Digikey; ComponentLink4URL: https://datasheet.ciiva.com/48711/001071516-da-01-en-ic-opamp-jfet-3mhz-s-tl081idr-soic-8-tid-48711207.pdf?src-supplier=Conrad; ComponentLink4Description: https://datasheet.ciiva.com/48711/001071516-da-01-en-ic-opamp-jfet-3mhz-s-tl081idr-soic-8-tid-48711207.pdf?src-supplier=Conrad
footprint SOIC-8(0.154", 3.90mm Width)
pins: 1 NC (power), 2 IN-, 3 IN+, 4 VCC- (power), 5 NC (power), 6 OUT, 7 VCC+ (power), 8 NC (power)

## TL084CPWR
designator U?
IC OPAMP JFET 4 CIRCUIT 14TSSOP; Manufacturer: Texas Instruments; Manufacturer Part Number: TL084CPWR; Nominal Supply Current: 11.2mA; Number of Channels: 4; Voltage Gain: 106.02dB; Max Dual Supply Voltage: 18V; Min Dual Supply Voltage: 3.5V; Unity Gain Bandwidth Product: 3MHz; Common Mode Rejection Ratio: 70dB; Slew Rate: 13V/µs; Max I/O Voltage: 15mV; Input Bias Current: 400pA; Operating Supply Current: 1.4mA; Min Supply Voltage: 7V; Quiescent Current: 2.8A; Max Power Dissipation: 680mW; Supplier 1: Mouser; RoHS: Yes; Category: Amplifiers - Op Amps, Buffer, Instrumentation; Stock 1: 3; Pricing 1: 1=0.64000, 10=0.54500, 50=0.54500, 100=0.37800, 500=0.32000, 1000=0.24700, 2000=0.22500, 10000=0.22500 (USD); Case/Package: TSSOP; Number of Pins: 14; Contact Plating: Gold; Min Operating Temperature: -40°C; Max Operating Temperature: 125°C; Packaging: Tape and Reel; Package Quantity: 1; Bandwidth: 3MHz; Nominal Gain Bandwidth Product: 3MHz; Number of Circuits: 4; Gain Bandwidth Product: 3MHz; Input Offset Voltage (Vos): 15mV; Number of Elements: 4; Max Supply Voltage: 18V; Number of Amplifiers: 4; Radiation Hardening: No; Lead Free: Lead Free; RoHS Compliant: Yes; REACH SVHC: No SVHC; ComponentLink1URL: https://datasheet.ciiva.com/34301/1064719-34301936.pdf?src-supplier=Jameco; ComponentLink1Description: https://datasheet.ciiva.com/34301/1064719-34301936.pdf?src-supplier=Jameco; ComponentLink2URL: https://datasheet.ciiva.com/1795/tl081a-1795644.pdf?src-supplier=Digi-Key; ComponentLink2Description: https://datasheet.ciiva.com/1795/tl081a-1795644.pdf?src-supplier=Digi-Key; ComponentLink3URL: https://datasheet.ciiva.com/1795/tl081a-1795643.pdf?src-supplier=Digi-Key; ComponentLink3Description: https://datasheet.ciiva.com/1795/tl081a-1795643.pdf?src-supplier=Digi-Key; ComponentLink4URL: https://datasheet.ciiva.com/1795/tl081a-1795645.pdf?src-supplier=Digi-Key; ComponentLink4Description: https://datasheet.ciiva.com/1795/tl081a-1795645.pdf?src-supplier=Digi-Key; ComponentLink5URL: https://datasheet.ciiva.com/14459/tl082-14459749.pdf?src-supplier=Avnet; ComponentLink5Description: https://datasheet.ciiva.com/14459/tl082-14459749.pdf?src-supplier=Avnet; ComponentLink6URL: https://datasheet.ciiva.com/48707/001072249-da-01-en-ic-opamp-jfet-3mh-tl084cpwr-tssop-14-tid-48707867.pdf?src-supplier=Conrad; ComponentLink6Description: https://datasheet.ciiva.com/48707/001072249-da-01-en-ic-opamp-jfet-3mh-tl084cpwr-tssop-14-tid-48707867.pdf?src-supplier=Conrad; Supplier Part Number 1: 595-TL084CPWR
footprint 14-TSSOP
part A pins: 1 1OUT, 2 IN-, 3 IN+, 4 VCC+ (power), 11 VCC- (power)
part B pins: 5 2IN+, 6 2IN-, 7 2OUT
part C pins: 8 3OUT, 9 3IN-, 10 3IN+
part D pins: 12 4IN+, 13 4IN-, 14 4OUT

## TLC272CDR
designator U?
IC CMOS 2 CIRCUIT 8SOIC; Manufacturer: Texas Instruments; Manufacturer Part Number: TLC272CDR; Max Supply Voltage: 16V; Min Supply Voltage: 3V; Voltage Gain: 87.23dB; Common Mode Rejection Ratio: 65dB; Gain Bandwidth Product: 1.7MHz; Number of Channels: 2; Slew Rate: 3.6V/µs; Max I/O Voltage: 10mV; Input Bias Current: 60pA; Operating Supply Current: 1.9mA; Output Current per Channel: 30mA; Amplifier Type: GENERAL PURPOSE; Supply Current: 4mA; Power Dissipation: 725mW; Supplier: Mouser; LCSC Part Number: C9374; RoHS: Yes; Item Type: IC; Stock: 26547; Pricing: 1=1.37, 10=0.858, 50=0.858, 100=0.691, 1000=0.631, 10000=0.519 (USD); Case/Package: D; Pins: 8; Min Operating Temperature: -40°C; Max Operating Temperature: 85°C; Packaging: Tape and Reel; Bandwidth: 1.7MHz; Package Quantity: 1; Nominal Gain Bandwidth Product: 1.7MHz; Number of Circuits: 2; Input Offset Voltage (Vos): 10mV; Series: LinCMOS™; Unity Gain Bandwidth Product: 1.7MHz; Number of Elements: 2; Number of Amplifiers: 2; Length: 4.9mm; Width: 3.91mm; Height: 1.58mm; Thickness: 1.58mm; Radiation Hardening: No; Lead Free: Lead Free; RoHS Compliant: Yes; Reach SVHC Compliant: No; ComponentLink1URL: https://datasheet.ciiva.com/46392/1831142-46392281.pdf?src-supplier=Element14; ComponentLink1Description: https://datasheet.ciiva.com/46392/1831142-46392281.pdf?src-supplier=Element14; ComponentLink2URL: https://datasheet.ciiva.com/1797/tlc272a-1797237.pdf?src-supplier=Digikey; ComponentLink2Description: https://datasheet.ciiva.com/1797/tlc272a-1797237.pdf?src-supplier=Digikey; ComponentLink3URL: https://datasheet.ciiva.com/1797/tlc272a-1797236.pdf?src-supplier=Digikey; ComponentLink3Description: https://datasheet.ciiva.com/1797/tlc272a-1797236.pdf?src-supplier=Digikey; ComponentLink4URL: https://datasheet.ciiva.com/1797/tlc272a-1797238.pdf?src-supplier=Digikey; ComponentLink4Description: https://datasheet.ciiva.com/1797/tlc272a-1797238.pdf?src-supplier=Digikey; ComponentLink5URL: https://datasheet.ciiva.com/14456/tlc277-14456667.pdf?src-supplier=Avnet; ComponentLink5Description: https://datasheet.ciiva.com/14456/tlc277-14456667.pdf?src-supplier=Avnet
footprint SOIC-8(0.154", 3.90mm Width)
part A pins: 1 OUT1, 2 IN1-, 3 IN1+, 4 VDD-/GND (power), 8 VDD+ (power)
part B pins: 5 IN2+, 6 IN2-, 7 OUT2

## TLC2272ACDR
designator U?
IC CMOS 2 CIRCUIT 8SOIC; Manufacturer: Texas Instruments; Manufacturer Part Number: TLC2272ACDR; Supplier: Mouser; LCSC Part Number: C478072; RoHS: Yes; Item Type: IC; Stock: 17106; Pricing: 1=2.33, 10=1.55, 50=1.55, 100=1.37, 1000=1.11, 10000=1.01 (USD); ComponentLink1URL: https://datasheet.ciiva.com/46397/1848959-46397530.pdf?src-supplier=Element14; ComponentLink1Description: https://datasheet.ciiva.com/46397/1848959-46397530.pdf?src-supplier=Element14; ComponentLink2URL: https://datasheet.ciiva.com/14456/tlc2274am-14456607.pdf?src-supplier=Avnet; ComponentLink2Description: https://datasheet.ciiva.com/14456/tlc2274am-14456607.pdf?src-supplier=Avnet; ComponentLink3URL: https://datasheet.ciiva.com/2974/tlc2274am-2974290.pdf?src-supplier=Avnet; ComponentLink3Description: https://datasheet.ciiva.com/2974/tlc2274am-2974290.pdf?src-supplier=Avnet; ComponentLink4URL: https://datasheet.ciiva.com/1797/tlc2274-1797212.pdf?src-supplier=Digikey; ComponentLink4Description: https://datasheet.ciiva.com/1797/tlc2274-1797212.pdf?src-supplier=Digikey; ComponentLink5URL: https://datasheet.ciiva.com/1797/tlc2274-1797213.pdf?src-supplier=Digikey; ComponentLink5Description: https://datasheet.ciiva.com/1797/tlc2274-1797213.pdf?src-supplier=Digikey; ComponentLink6URL: https://datasheet.ciiva.com/1797/tlc2274-1797214.pdf?src-supplier=Digikey; ComponentLink6Description: https://datasheet.ciiva.com/1797/tlc2274-1797214.pdf?src-supplier=Digikey
footprint SOIC-8(0.154", 3.90mm Width)
part A pins: 1 OUT1, 2 IN1-, 3 IN1+, 4 VDD-/GND (power), 8 VDD+ (power)
part B pins: 5 IN2+, 6 IN2-, 7 OUT2

## TLV171IDBVR
designator U?
IC OPAMP GP 1 CIRCUIT SOT23-5; Manufacturer: Texas Instruments; Manufacturer Part Number: TLV171IDBVR; Supplier: Mouser; LCSC Part Number: C2864299; RoHS: Yes; Item Type: IC; Stock: 79952; Pricing: 1=1.26, 10=1.09, 50=1.09, 100=0.829, 1000=0.578, 10000=0.478 (USD); ComponentLink1URL: http://www.ti.com/lit/ds/symlink/tlv171.pdf?src-supplier=Digikey; ComponentLink1Description: http://www.ti.com/lit/ds/symlink/tlv171.pdf?src-supplier=Digikey; ComponentLink2URL: http://www.ti.com/general/docs/suppproductinfo.tsp?distId=10&amp;gotoUrl=http%3A%2F%2Fwww.ti.com%2Flit%2Fgpn%2Ftlv171&src-supplier=Digikey; ComponentLink2Description: http://www.ti.com/general/docs/suppproductinfo.tsp?distId=10&amp;gotoUrl=http%3A%2F%2Fwww.ti.com%2Flit%2Fgpn%2Ftlv171&src-supplier=Digikey
footprint SOT-23-5
pins: 1 OUT, 2 V- (power), 3 IN+, 4 IN-, 5 V+ (power)

## TLV9001IDCKR
designator U?
IC CMOS 1 CIRCUIT SC70-5; Manufacturer: Texas Instruments; Manufacturer Part Number: TLV9001IDCKR; Number of Channels: 1; Slew Rate: 2V/µs; Gain Bandwidth Product: 1MHz; Input Bias Current: 5pA; Input Offset Voltage (Vos): 400uV; Operating Supply Current: 60uA; Output Current per Channel: 40mA; Supplier: Mouser; Supplier Part Number: 595-TLV9001IDCKR; RoHS: Yes; Item Type: IC; Stock: 13115; Pricing: 1=0.47, 10=0.348, 50=0.348, 100=0.194, 1000=0.146, 10000=0.117 (USD); Mounting Technology: Surface Mount; Min Operating Temperature: -40°C; Max Operating Temperature: 125°C; Packaging: Cut Tape; Number of Circuits: 1; Series: -; RoHS Compliant: Yes; ComponentLink1URL: http://www.ti.com/lit/ds/symlink/tlv9001.pdf?src-supplier=Digikey; ComponentLink1Description: http://www.ti.com/lit/ds/symlink/tlv9001.pdf?src-supplier=Digikey; LCSC Part Number: C398362
footprint SC-70-5
pins: 1 IN+, 2 V- (power), 3 IN-, 4 OUT, 5 V+ (power)

## TLV9301IDCKR
designator U?
IC OPAMP GP 1 CIRCUIT SC70-5; Manufacturer: Texas Instruments; Manufacturer Part Number: TLV9301IDCKR; Supplier 1: Mouser; RoHS: No; Category: Amplifiers - Op Amps, Buffer, Instrumentation; Stock 1: 29098; Pricing 1: 1=0.67, 10=0.562, 50=0.562, 100=0.445, 1000=0.284, 10000=0.283 (USD); Supplier Part Number 1: 595-TLV9301IDCKR; LCSC Part Number: C4366617; Item Type: IC
footprint SC-70-5
pins: 1 IN+, 2 V- (power), 3 IN-, 4 OUT, 5 V+ (power)

## TP5591-TR
designator U?
SOT-23-5 Precision OpAmps ROHS; Manufacturer: 3PEAK; Manufacturer Part Number: TP5591-TR; Item Type: OpAmp; Package: SOT-23-5; LCSC Part Number: C248602; ComponentLink1Description: LCSC; ComponentLink1URL: https://www.lcsc.com/product-detail/Precision-OpAmps_3PEAK-TP5591-TR_C248602.html
footprint SOT-23-5
pins: 1 OUT, 2 V- (power), 3 IN+, 4 IN-, 5 V+ (power)

## TPA2011D1YFFR
designator U?
IC AMP AUDIO PWR 3.2W D 9DSBGA; Manufacturer: Texas Instruments; Manufacturer Part Number: TPA2011D1YFFR; Max Power Dissipation: 525mW; Max Supply Voltage: 5.5V; Min Supply Voltage: 2.5V; Max Output Power: 3.24W; Number of Channels: 1; Power Supply Rejection Ratio (PSRR): 86dB; Quiescent Current: 1.8mA; Supply Current: 1.5mA; Supplier 1: Mouser; RoHS: Yes; Category: Amplifiers - Audio; Stock 1: 6964; Pricing 1: 1=0.83, 10=0.698, 50=0.698, 100=0.529, 1000=0.353, 10000=0.293 (USD); Case/Package: BGA; Number of Pins: 9; Min Operating Temperature: -40°C; Max Operating Temperature: 85°C; Output Power: 3.2W; Series: -; Packaging: Tape and Reel; Package Quantity: 3000; Power Dissipation: 525mW; Radiation Hardening: No; Lead Free: Lead Free; RoHS Compliant: Yes; ComponentLink1URL: https://datasheet.ciiva.com/1789/tpa2011d1-1789073.pdf?src-supplier=Digi-Key; ComponentLink1Description: https://datasheet.ciiva.com/1789/tpa2011d1-1789073.pdf?src-supplier=Digi-Key; ComponentLink2URL: https://datasheet.ciiva.com/1789/tpa2011d1-1789074.pdf?src-supplier=Digi-Key; ComponentLink2Description: https://datasheet.ciiva.com/1789/tpa2011d1-1789074.pdf?src-supplier=Digi-Key; ComponentLink3URL: https://datasheet.ciiva.com/1789/tpa2011d1-1789075.pdf?src-supplier=Digi-Key; ComponentLink3Description: https://datasheet.ciiva.com/1789/tpa2011d1-1789075.pdf?src-supplier=Digi-Key; ComponentLink4URL: https://datasheet.ciiva.com/15223/getdatasheetpartid-306371-15223959.pdf?src-supplier=Verical; ComponentLink4Description: https://datasheet.ciiva.com/15223/getdatasheetpartid-306371-15223959.pdf?src-supplier=Verical; Supplier Part Number 1: 595-TPA2011D1YFFR; LCSC Part Number: C468251; Item Type: IC
footprint 9-DSBGA
pins: A1 IN+, A2 GND, A3 VO-, B1 VDD, B2 PVDD, B3 PGND, C1 IN-, C2 EN, C3 VO+

## TPA2012D2RTJR
designator U?
IC AMP CLASS D STEREO 2.1W 20QFN; Manufacturer: Texas Instruments; Manufacturer Part Number: TPA2012D2RTJR; Supplier: Mouser; Supplier Part Number: 595-TPA2012D2RTJR; RoHS: Yes; Category: Amplifiers - Audio; Stock: 4547; Pricing: 1=1.54, 10=1.39, 50=1.39, 100=1.11, 250=1.05, 500=0.919, 1000=0.761, 3000=0.728, 6000=0.682, 9000=0.656, 10000=0.656 (USD); ComponentLink1URL: https://datasheet.ciiva.com/15131/getdatasheetpartid-186330-15131773.pdf?src-supplier=Verical; ComponentLink1Description: https://datasheet.ciiva.com/15131/getdatasheetpartid-186330-15131773.pdf?src-supplier=Verical; ComponentLink2URL: https://datasheet.ciiva.com/2969/tpa2012d2-2969809.pdf?src-supplier=Avnet; ComponentLink2Description: https://datasheet.ciiva.com/2969/tpa2012d2-2969809.pdf?src-supplier=Avnet; ComponentLink3URL: https://datasheet.ciiva.com/1481/1775181-1481986.pdf?src-supplier=Element14; ComponentLink3Description: https://datasheet.ciiva.com/1481/1775181-1481986.pdf?src-supplier=Element14; ComponentLink4URL: https://datasheet.ciiva.com/1789/tpa2012d2-1789010.pdf?src-supplier=Digi-Key; ComponentLink4Description: https://datasheet.ciiva.com/1789/tpa2012d2-1789010.pdf?src-supplier=Digi-Key; ComponentLink5URL: https://datasheet.ciiva.com/1789/tpa2012d2-1789011.pdf?src-supplier=Digi-Key; ComponentLink5Description: https://datasheet.ciiva.com/1789/tpa2012d2-1789011.pdf?src-supplier=Digi-Key; ComponentLink6URL: https://datasheet.ciiva.com/1789/tpa2012d2-1789012.pdf?src-supplier=Digi-Key; ComponentLink6Description: https://datasheet.ciiva.com/1789/tpa2012d2-1789012.pdf?src-supplier=Digi-Key; ComponentLink7URL: https://datasheet.ciiva.com/48709/001071054-da-01-en-ic-amp-audio-p-tpa2012d2rtjr-wqfn-20-tid-48709045.pdf?src-supplier=Conrad; ComponentLink7Description: https://datasheet.ciiva.com/48709/001071054-da-01-en-ic-amp-audio-p-tpa2012d2rtjr-wqfn-20-tid-48709045.pdf?src-supplier=Conrad; LCSC Part Number: C7717; Item Type: IC
footprint 20-QFN (4x4)
pins: 1 G1, 2 OUTL+, 3 PVDD, 4 PGND, 5 OUTL-, 7 ~{SDL}, 8 ~{SDR}, 9 AVDD, 11 OUTR-, 12 PGND, 13 PVDD, 14 OUTR+, 15 G0, 16 INR+, 17 INR-, 18 AGND, 19 INL-, 20 INL+, 21 GND

## TPA3111D1PWPR
designator U?
Amplifier IC 1-Channel (Mono) Class D 28-HTSSOP; Manufacturer: Texas Instruments; Manufacturer Part Number: TPA3111D1PWPR; Output Power: 10W; Min Supply Voltage: 8V; Max Supply Voltage: 26V; Nominal Supply Current: 40mA; Power Dissipation: 4.98W; Number of Channels: 1; Voltage Gain: 36dB; Gain: 37dB; Load Impedance: 8R; Supplier 1: Mouser; RoHS: Yes; Category: Amplifiers - Audio; Pricing 1: 1=2.26000, 10=2.04000, 25=1.92000, 50=1.92000, 100=1.64000, 250=1.54000, 500=1.35000, 1000=1.12000, 2000=1.11000, 10000=1.11000 (USD); Case/Package: HTSSOP; Number of Pins: 28; Min Operating Temperature: -40°C; Max Operating Temperature: 85°C; Packaging: Tape and Reel; Package Quantity: 2000; Max Output Power: 10W; Series: SpeakerGuard™; Supply Current: 40mA; Radiation Hardening: No; Lead Free: Lead Free; RoHS Compliant: Yes; REACH SVHC: No SVHC; ComponentLink1URL: https://datasheet.ciiva.com/15131/getdatasheetpartid-376403-15131942.pdf?src-supplier=Verical; ComponentLink1Description: https://datasheet.ciiva.com/15131/getdatasheetpartid-376403-15131942.pdf?src-supplier=Verical; ComponentLink2URL: https://datasheet.ciiva.com/2969/tpa3111d1-2969959.pdf?src-supplier=Avnet; ComponentLink2Description: https://datasheet.ciiva.com/2969/tpa3111d1-2969959.pdf?src-supplier=Avnet; ComponentLink3URL: https://datasheet.ciiva.com/1789/tpa3111d1-1789051.pdf?src-supplier=Digi-Key; ComponentLink3Description: https://datasheet.ciiva.com/1789/tpa3111d1-1789051.pdf?src-supplier=Digi-Key; Supplier Part Number 1: 595-TPA3111D1PWPR; LCSC Part Number: C114457
footprint 28-HTSSOP_
pins: 1 ~{SD}, 2 ~{FAULT}, 3 GND, 4 GND, 5 GAIN0, 6 GAIN1, 7 AVCC, 8 AGND, 9 GVDD, 10 PLIMIT, 11 INN, 12 INP, 13 NC, 14 AVCC, 15 PVCC, 16 PVCC, 17 BSP, 18 OUTP, 19 PGND, 20 OUTP, 21 BSP, 22 BSN, 23 OUTN, 24 PGND, 25 OUTN, 26 BSN, 27 PVCC, 28 PVCC, 29 GND

## TPMCP6021T-E/OT
designator U?
SOT-23-5 Operational Amplifier ROHS; Manufacturer Part Number: TPMCP6021T-E/OT; Manufacturer: TECH PUBLIC; Item Type: IC; Footprint: SOT-23-5; LCSC Part Number: C2923365; ComponentLink1Description: LCSC; ComponentLink1URL: https://www.lcsc.com/product-detail/Operational-Amplifier_TECH-PUBLIC-TPMCP6021T-E-OT_C2923365.html
footprint SOT-23-5
pins: 1 OUT, 2 V- (power), 3 IN+, 4 IN-, 5 V+ (power)